# Altium footprint library ILS_TETRA_LIB_P.PcbLib: 4 footprints
Each footprint in its own frame and in the unit in brackets; x right, y up, seen from the top. Pads: shape width x height; smd on the part's side, far side on the other; paste and mask are expansions set on the pad; w line width, h text height; cw(c..) or ccw(c..) is an arc to the next point about the centre after c.
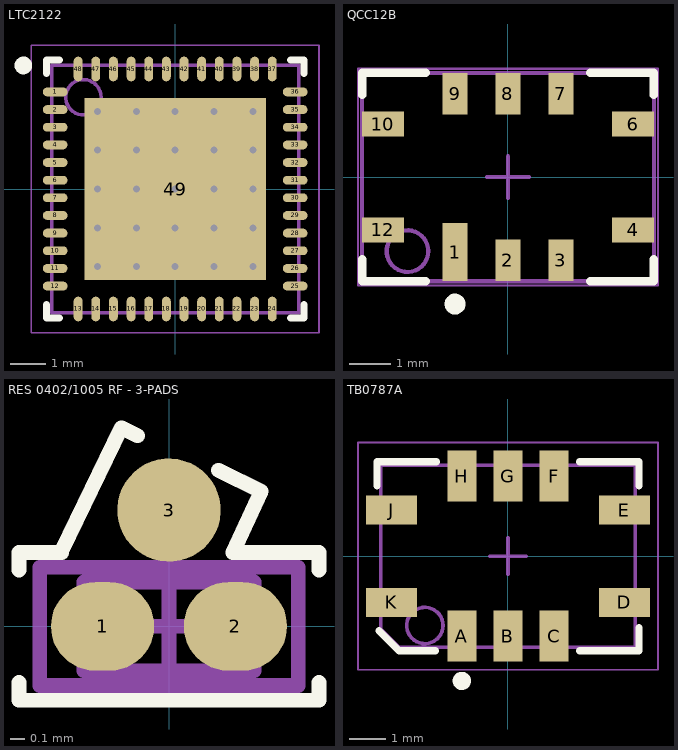
[diagram p0: the footprints below, top view; thin cyan lines are the x and y axes]

## LTC2122 [mm] "LTC2122, QFN, 48-Leads, Body 7,00x7,00mm, Pitch 0,50mm, Thermal Pad 5,15x5,15mm, IPC Medium Density"
height 0.8
pads (49):
  oval 0.7x0.25 smd: 1(-3.4,2.75) 2(-3.4,2.25) 3(-3.4,1.75) 4(-3.4,1.25) 5(-3.4,0.75) 6(-3.4,0.25) 7(-3.4,-0.25) 8(-3.4,-0.75) 9(-3.4,-1.25) 10(-3.4,-1.75) 11(-3.4,-2.25) 12(-3.4,-2.75) 25(3.4,-2.75) 26(3.4,-2.25) 27(3.4,-1.75) 28(3.4,-1.25) 29(3.4,-0.75) 30(3.4,-0.25) 31(3.4,0.25) 32(3.4,0.75) 33(3.4,1.25) 34(3.4,1.75) 35(3.4,2.25) 36(3.4,2.75)
  oval 0.25x0.7 smd: 13(-2.75,-3.4) 14(-2.25,-3.4) 15(-1.75,-3.4) 16(-1.25,-3.4) 17(-0.75,-3.4) 18(-0.25,-3.4) 19(0.25,-3.4) 20(0.75,-3.4) 21(1.25,-3.4) 22(1.75,-3.4) 23(2.25,-3.4) 24(2.75,-3.4) 37(2.75,3.4) 38(2.25,3.4) 39(1.75,3.4) 40(1.25,3.4) 41(0.75,3.4) 42(0.25,3.4) 43(-0.25,3.4) 44(-0.75,3.4) 45(-1.25,3.4) 46(-1.75,3.4) 47(-2.25,3.4) 48(-2.75,3.4)
  rect 5.15x5.15 smd: 49(0,0)
via 2.2,-2.2 diameter 0.5 hole 0.2
via 1.1,-2.2 diameter 0.5 hole 0.2
via 0,-2.2 diameter 0.5 hole 0.2
via -1.1,-2.2 diameter 0.5 hole 0.2
via -2.2,-2.2 diameter 0.5 hole 0.2
via 2.2,-1.1 diameter 0.5 hole 0.2
via 1.1,-1.1 diameter 0.5 hole 0.2
via 0,-1.1 diameter 0.5 hole 0.2
via -1.1,-1.1 diameter 0.5 hole 0.2
via -2.2,-1.1 diameter 0.5 hole 0.2
via 2.2,0 diameter 0.5 hole 0.2
via 1.1,0 diameter 0.5 hole 0.2
via 0,0 diameter 0.5 hole 0.2
via -1.1,0 diameter 0.5 hole 0.2
via -2.2,0 diameter 0.5 hole 0.2
via 2.2,1.1 diameter 0.5 hole 0.2
via 1.1,1.1 diameter 0.5 hole 0.2
via 0,1.1 diameter 0.5 hole 0.2
via -1.1,1.1 diameter 0.5 hole 0.2
via -2.2,1.1 diameter 0.5 hole 0.2
via 2.2,2.2 diameter 0.5 hole 0.2
via 1.1,2.2 diameter 0.5 hole 0.2
via 0,2.2 diameter 0.5 hole 0.2
via -1.1,2.2 diameter 0.5 hole 0.2
via -2.2,2.2 diameter 0.5 hole 0.2
Top Overlay:
  circle w0.25: c-4.3,3.5 r0.125
  lines w0.2: -3.65,-3.275 -3.65,-3.65 -3.275,-3.65 ; -3.65,3.275 -3.65,3.65 -3.275,3.65 ; 3.275,-3.65 3.65,-3.65 3.65,-3.275 ; 3.275,3.65 3.65,3.65 3.65,3.275
Mechanical 13:
  circle w0.1: c-2.6,2.6 r0.5
  lines w0.1: -3.5,-3.5 3.5,-3.5 3.5,3.5 -3.5,3.5 -3.5,-3.5
Mechanical 15:
  lines w0.05: -4.075,-4.075 4.075,-4.075 4.075,4.075 -4.075,4.075 -4.075,-4.075
  lines w0.1: -0.5,0 0.5,0 ; 0,-0.5 0,0.5
3D body "LTC2122.step": height 0.8, standoff 0, extent -3.7,-3.7 3.7,3.7

## QCC12B [mm] "Ceramic package QCC12B"
height 1.5
pads (10):
  rect 0.6x1.4 smd: 1(-1.27,-1.8)
  rect 0.6x1 smd: 2(0,-2) 3(1.27,-2) 7(1.27,2) 8(0,2) 9(-1.27,2)
  rect 1x0.6 smd: 4(3,-1.27) 6(3,1.27) 10(-3,1.27) 12(-3,-1.27)
Top Overlay:
  circle w0.25: c-1.27,-3.048 r0.125
  lines w0.2: -3.5,-1.97 -3.5,-2.5 -1.97,-2.5 ; -3.5,1.97 -3.5,2.5 -1.97,2.5 ; 1.97,-2.5 3.5,-2.5 3.5,-1.97 ; 1.97,2.5 3.5,2.5 3.5,1.97
Mechanical 13:
  circle w0.1: c-2.413,-1.778 r0.5
  lines w0.1: -3.5,-2.5 3.5,-2.5 3.5,2.5 -3.5,2.5 -3.5,-2.5
Mechanical 15:
  lines w0.05: -3.6,-2.6 3.6,-2.6 3.6,2.6 -3.6,2.6 -3.6,-2.6
  lines w0.1: -0.5,0 0.5,0 ; 0,-0.5 0,0.5
3D body "QCC12B.step": height 1.5, standoff 0, extent -3.5,-2.5 3.5,2.5

## RES 0402/1005 RF - 3-PADS [mm] "Chip Resistor, 2-Leads, Body 1.0x0.5mm, IPC High Density"
height 0.4
pads (3):
  oval 0.7x0.6 smd: 1(-0.45,0) 2(0.45,0)
  round 0.7 smd paste-2: 3(0,0.787)
Top Overlay:
  lines w0.1: -1.016,-0.381 -1.016,-0.5 1.016,-0.5 1.016,-0.381 ; -1.016,0.381 -1.016,0.5 -0.727,0.5 ; -0.762,0.5 -0.727,0.512 -0.322,1.345 -0.213,1.291 ; 0.335,1.057 0.624,0.915 0.432,0.5 1.016,0.5 1.016,0.381
Mechanical 13:
  lines w0.1: -0.575,-0.3 0.575,-0.3 0.575,0.3 -0.575,0.3 -0.575,-0.3
Mechanical 15:
  lines w0.1: -0.3,0 0.3,0 ; 0,-0.3 0,0.3 ; -0.875,-0.4 0.875,-0.4 0.875,0.4 -0.875,0.4 -0.875,-0.4
3D body "0402 resistor.STEP": height 0.35, standoff 0, extent -0.5,-0.25 0.5,0.25

## TB0787A [mm] "TB0787A MP02661"
height 1.7
pads (10):
  rect 0.8x1.4 smd: A(-1.27,-2.2) B(0,-2.2) C(1.27,-2.2) F(1.27,2.2) G(0,2.2) H(-1.27,2.2)
  rect 1.4x0.8 smd: D(3.2,-1.27) E(3.2,1.27) J(-3.2,1.27) K(-3.2,-1.27)
Top Overlay:
  circle w0.25: c-1.27,-3.429 r0.125
  lines w0.2: -3.6,1.935 -3.6,2.6 -1.97,2.6 ; -3.55,-2.05 -3,-2.6 -2,-2.6 ; 1.97,-2.6 3.6,-2.6 3.6,-1.965 ; 1.97,2.6 3.6,2.6 3.6,1.935
Mechanical 13:
  circle w0.1: c-2.286,-1.905 r0.5
  lines w0.1: -3.5,-2 -3.5,2.5 3.5,2.5 3.5,-2.5 -3,-2.5 -3.5,-2
Mechanical 15:
  lines w0.05: -4.125,-3.125 -4.125,3.125 4.125,3.125 4.125,-3.125 -4.125,-3.125
  lines w0.1: -0.5,0 0.5,0 ; 0,-0.5 0,0.5
3D body "TB0787A.step": height 1.7, standoff 0, extent -3.5,-2.5 3.5,2.5